# Altium schematic symbol library 3PH_4Wire_EMI_Filter.SchLib: 1 symbol
Pins are listed as number, name and electrical type; pins without a type are passive.

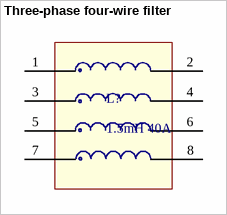
[diagram p0: symbol Three-phase four-wire filter]

## Three-phase four-wire filter
designator L?, comment 1.5mH 40A
Three-phase four-wire common mode inductor, high-power ferrite choke 1.5mH 40A, four-phase filter choke
footprint high-power ferrite choke 1.5mH 40A (Three-phase four-wire common mode inductor, high-power ferrite choke 1.5mH 40A, four-phase filter choke)
pins: 1 0, 2 0, 3 0, 4 0, 5 0, 6 0, 7 0, 8 0